# Altium schematic symbol library TCAN1044AVDRQ1.SchLib: 1 symbol
Pins are listed as number, name and electrical type; pins without a type are passive.

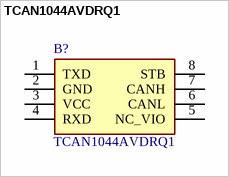
[diagram p0: symbol TCAN1044AVDRQ1]

## TCAN1044AVDRQ1
designator B?
CAN Interface IC Enhanced automotive CAN transceiver with standby and 1.8-V I/O support; Manufacturer_Name: Texas Instruments; Geometry.Height: 1.75mm; Manufacturer_Part_Number: TCAN1044AVDRQ1; Mouser Part Number: 595-TCAN1044AVDRQ1; Mouser Price/Stock: https://www.mouser.co.uk/ProductDetail/Texas-Instruments/TCAN1044AVDRQ1?qs=A6eO%252BMLsxmTQ0G0Mn%252B%252BM7w%3D%3D; Arrow Part Number: TCAN1044AVDRQ1; Arrow Price/Stock: https://www.arrow.com/en/products/tcan1044avdrq1/texas-instruments.html?utm_currency=USD&region=europe; Datasheet Link: https://www.ti.com/lit/gpn/tcan1044av-q1
footprint SOIC127P600X175-8N
pins: 1 TXD, 2 GND, 3 VCC, 4 RXD, 5 NC_VIO, 6 CANL, 7 CANH, 8 STB